# Altium footprint library AVP32F335_EVM_Rev1.0.PcbLib: 50 footprints (part 3 of 4)
Each footprint in its own frame and in the unit in brackets; x right, y up, seen from the top. Pads: shape width x height; smd on the part's side, far side on the other; paste and mask are expansions set on the pad; w line width, h text height; cw(c..) or ccw(c..) is an arc to the next point about the centre after c.
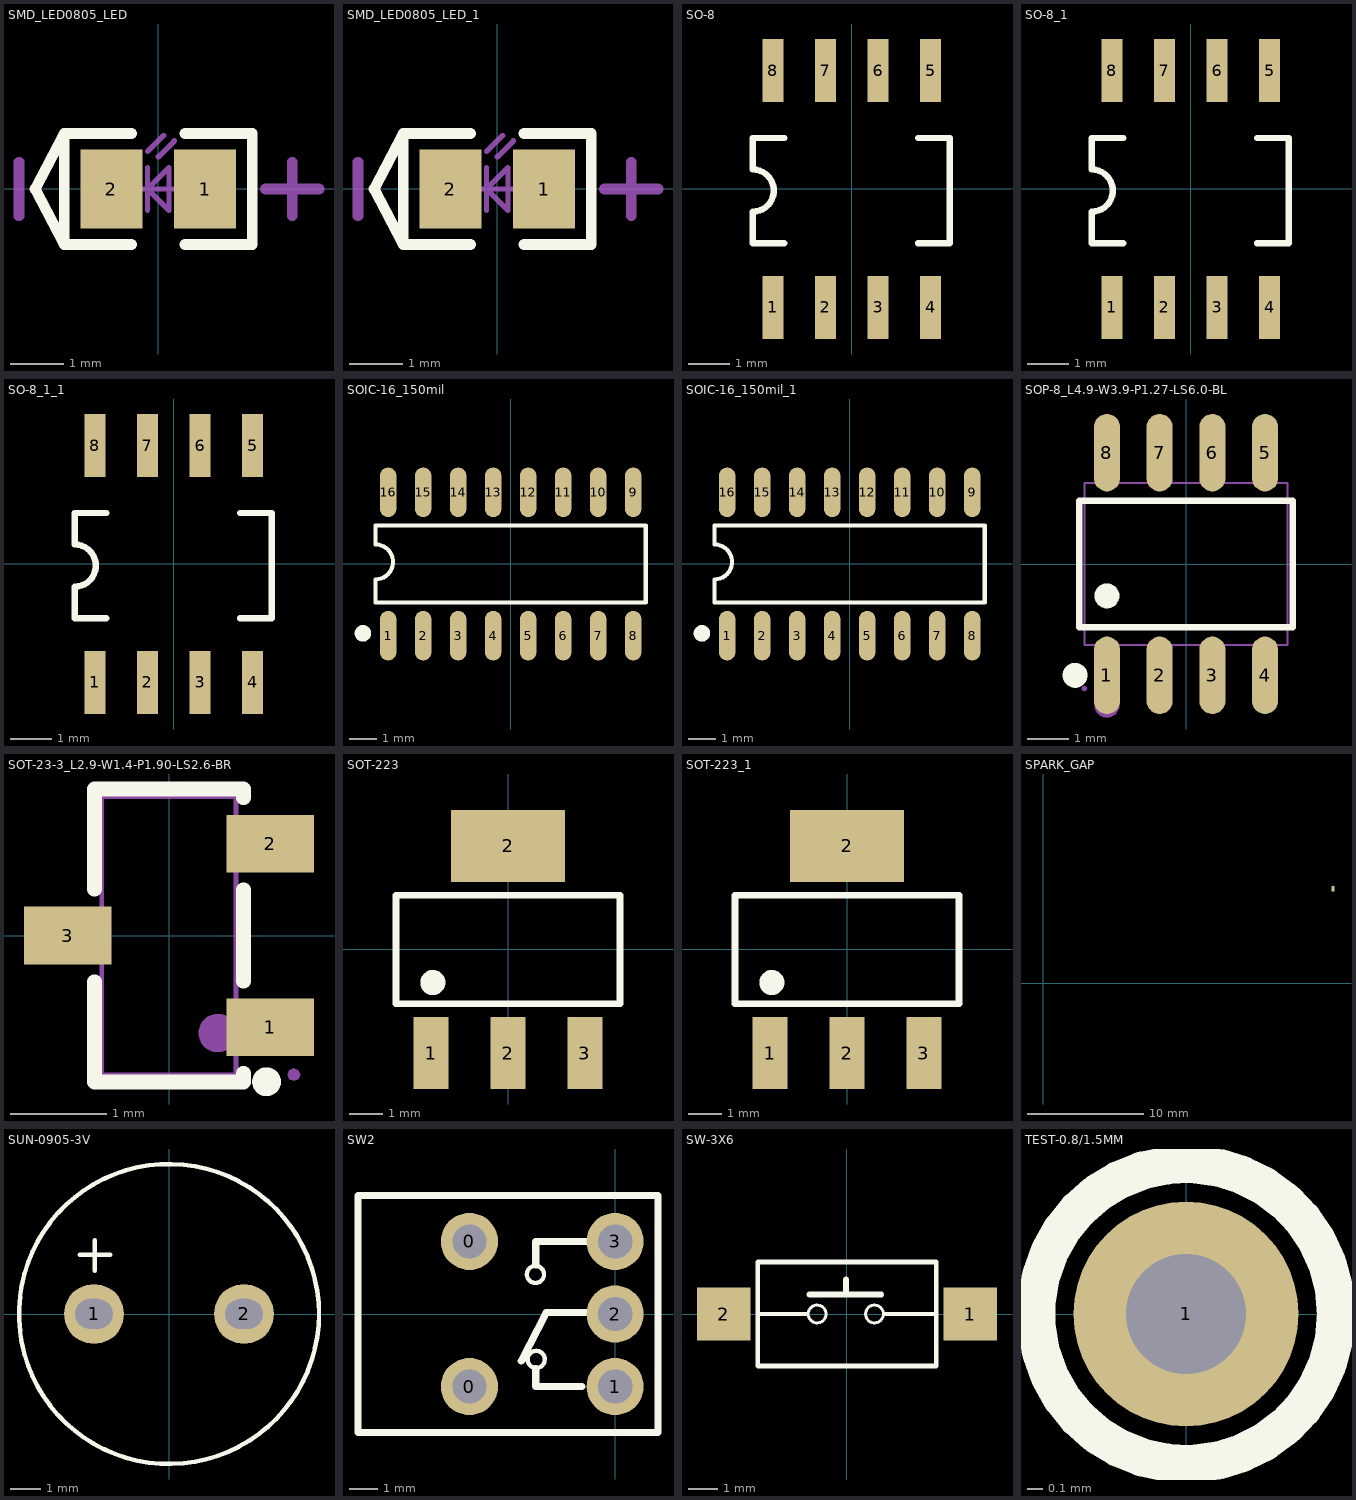
[diagram p2: the footprints below, top view; thin cyan lines are the x and y axes]

## SMD_LED0805_LED [mm]
height 11
pads (2):
  rect 1.16x1.47 smd: 1(0.875,0) 2(-0.875,0)
Top Overlay:
  lines w0.2: -0.5,-1.035 -1.755,-1.035 ; -0.5,1.035 -1.755,1.035 ; 0.5,-1.035 1.755,-1.035 1.755,1.035 0.5,1.035 ; -1.755,-1.035 -2.3,0 -1.755,1.035 ; -1.755,-1.035 -1.755,1.035
Mechanical 13:
  lines w0.1: -0.4,0 0.4,0 ; -0.2,-0.4 -0.2,0.4 ; -0.2,0.7 0.1,1 ; 0,0.6 0.3,0.9 ; -0.2,0 0.2,-0.4 0.2,0.4 -0.2,0
Mechanical 15:
  lines w0.203: -2.6,-0.5 -2.6,0.5 ; 2,0 3,0 ; 2.5,-0.5 2.5,0.5
3D body "User Library-led_0805.step": height 1.1, standoff 0, extent -1.01,-0.625 1.01,0.625

## SMD_LED0805_LED_1 [mm]
height 8
pads (2):
  rect 1.16x1.47 smd: 1(0.875,0) 2(-0.875,0)
Top Overlay:
  lines w0.2: -0.5,-1.035 -1.755,-1.035 ; -0.5,1.035 -1.755,1.035 ; 0.5,-1.035 1.755,-1.035 1.755,1.035 0.5,1.035 ; -1.755,-1.035 -1.755,1.035 ; -1.755,-1.035 -2.3,0 -1.755,1.035
Mechanical 13:
  lines w0.1: -0.4,0 0.4,0 ; -0.2,-0.4 -0.2,0.4 ; -0.2,0.7 0.1,1 ; 0,0.6 0.3,0.9 ; -0.2,0 0.2,0.4 0.2,-0.4 -0.2,0
Mechanical 15:
  lines w0.203: -2.6,-0.5 -2.6,0.5 ; 2,0 3,0 ; 2.5,-0.5 2.5,0.5
3D body "User Library-led_0805.step": height 1.1, standoff 0, extent -1.01,-0.625 1.01,0.625

## SO-8 [mil]
pads (8):
  rect 20x60 smd: 1(-75,-112.5) 2(-25,-112.5) 3(25,-112.5) 4(75,-112.5) 5(75,112.5) 6(25,112.5) 7(-25,112.5) 8(-75,112.5)
Top Overlay:
  lines w6: -64,-51.5 -94,-51.5 -94,-21.5 ccw(c-94,-1.5) -94,18.5 -94,48.5 -64,48.5 ; 63,-51.5 93,-51.5 93,48.5 63,48.5
3D body "m08a.stp": height 63.98, standoff 0, extent -96.45,-111.1 96.46,125.12

## SO-8_1 [mil]
height 35.43
pads (8):
  rect 20x60 smd: 1(-75,-112.5) 2(-25,-112.5) 3(25,-112.5) 4(75,-112.5) 5(75,112.5) 6(25,112.5) 7(-25,112.5) 8(-75,112.5)
Top Overlay:
  lines w6: -64,-51.5 -94,-51.5 -94,-21.5 ccw(c-94,-1.5) -94,18.5 -94,48.5 -64,48.5 ; 63,-51.5 93,-51.5 93,48.5 63,48.5
3D body "m08a.stp": height 63.98, standoff 0, extent -96.45,-111.1 96.46,125.12

## SO-8_1_1 [mil]
height 35.43
pads (8):
  rect 20x60 smd: 1(-75,-112.5) 2(-25,-112.5) 3(25,-112.5) 4(75,-112.5) 5(75,112.5) 6(25,112.5) 7(-25,112.5) 8(-75,112.5)
Top Overlay:
  lines w6: -64,-51.5 -94,-51.5 -94,-21.5 ccw(c-94,-1.5) -94,18.5 -94,48.5 -64,48.5 ; 63,-51.5 93,-51.5 93,48.5 63,48.5
3D body "m08a.stp": height 63.98, standoff 0, extent -96.45,-111.1 96.46,125.12

## SOIC-16_150mil [mm]
height 6.34
pads (16):
  oval 0.6x1.8 smd: 1(-4.445,-2.6) 2(-3.175,-2.6) 3(-1.905,-2.6) 4(-0.635,-2.6) 5(0.635,-2.6) 6(1.905,-2.6) 7(3.175,-2.6) 8(4.445,-2.6) 9(4.445,2.6) 10(3.175,2.6) 11(1.905,2.6) 12(0.635,2.6) 13(-0.635,2.6) 14(-1.905,2.6) 15(-3.175,2.6) 16(-4.445,2.6)
Top Overlay:
  circle w0.3: c-5.359,-2.515 r0.15
  lines w0.15: -4.902,1.397 -4.902,0.711 cw(c-4.902,0.076) -4.902,-0.559 -4.902,-1.397 -4.899,-1.4 4.9,-1.4 4.9,1.4 -4.9,1.4
3D body "SW3DPS-SO-16-DEFAULT.step": height 1.45, standoff 0, extent -5.004,-2.8 4.978,3.105

## SOIC-16_150mil_1 [mm]
height 6.34
pads (16):
  oval 0.6x1.8 smd: 1(-4.445,-2.6) 2(-3.175,-2.6) 3(-1.905,-2.6) 4(-0.635,-2.6) 5(0.635,-2.6) 6(1.905,-2.6) 7(3.175,-2.6) 8(4.445,-2.6) 9(4.445,2.6) 10(3.175,2.6) 11(1.905,2.6) 12(0.635,2.6) 13(-0.635,2.6) 14(-1.905,2.6) 15(-3.175,2.6) 16(-4.445,2.6)
Top Overlay:
  circle w0.3: c-5.359,-2.515 r0.15
  lines w0.15: -4.902,1.397 -4.902,0.711 cw(c-4.902,0.076) -4.902,-0.559 -4.902,-1.397 -4.899,-1.4 4.9,-1.4 4.9,1.4 -4.9,1.4
3D body "SW3DPS-SO-16-DEFAULT.step": height 1.45, standoff 0, extent -5.004,-2.8 4.978,3.105

## SOP-8_L4.9-W3.9-P1.27-LS6.0-BL [mm]
height 10.6
pads (8):
  oval 0.63x1.865 smd: 1(-1.905,-2.682) 2(-0.635,-2.682) 3(0.635,-2.682) 4(1.905,-2.682) 5(1.905,2.683) 6(0.635,2.683) 7(-0.635,2.683) 8(-1.905,2.683)
Top Overlay:
  circle w0.3: c-1.905,-0.769 r0.15
  circle w0.3: c-2.672,-2.682 r0.15
  lines w0.152: -2.576,-1.521 -2.576,1.521 2.576,1.521 2.576,-1.521 -2.576,-1.521
Mechanical 6:
  circle w0.3: c-1.905,-3.4 r0.15
Mechanical 15:
  region: -2.385,-3 -2.404,-2.954 -2.45,-2.935 -2.496,-2.954 -2.515,-3 -2.496,-3.046 -2.45,-3.065 -2.404,-3.046
  region: 1.695,1.94 1.695,2.175 2.115,2.175 2.115,1.94
  region: 1.695,2.165 1.695,3 2.115,3 2.115,2.165
  region: 0.425,1.94 0.425,2.175 0.845,2.175 0.845,1.94
  region: 0.425,2.165 0.425,3 0.845,3 0.845,2.165
  region: -0.845,1.94 -0.845,2.175 -0.425,2.175 -0.425,1.94
  region: -0.845,2.165 -0.845,3 -0.425,3 -0.425,2.165
  region: -2.115,1.94 -2.115,2.175 -1.695,2.175 -1.695,1.94
  region: -2.115,2.165 -2.115,3 -1.695,3 -1.695,2.165
  region: 1.695,-2.175 1.695,-1.94 2.115,-1.94 2.115,-2.175
  region: 1.695,-3 1.695,-2.165 2.115,-2.165 2.115,-3
  region: 0.425,-2.175 0.425,-1.94 0.845,-1.94 0.845,-2.175
  region: 0.425,-3 0.425,-2.165 0.845,-2.165 0.845,-3
  region: -0.845,-2.175 -0.845,-1.94 -0.425,-1.94 -0.425,-2.175
  region: -0.845,-3 -0.845,-2.165 -0.425,-2.165 -0.425,-3
  region: -2.115,-2.175 -2.115,-1.94 -1.695,-1.94 -1.695,-2.175
  region: -2.115,-3 -2.115,-2.165 -1.695,-2.165 -1.695,-3
  lines w0.051: -2.45,-1.95 -2.45,1.95 2.45,1.95 2.45,-1.95 -2.45,-1.95

## SOT-23-3_L2.9-W1.4-P1.90-LS2.6-BR [mm]
height 10.6
pads (3):
  rect 0.91x0.6 smd: 1(1.055,-0.955) 2(1.055,0.955) 3(-1.055,0)
Top Overlay:
  circle w0.15: c1.016,-1.524 r0.075
  lines w0.152: -0.776,-0.48 -0.776,-1.526 0.776,-1.526 0.776,-1.435 ; -0.776,0.48 -0.776,1.526 0.776,1.526 0.776,1.435 ; 0.776,-0.475 0.776,0.475
Mechanical 6:
  circle w0.2: c0.508,-1.016 r0.1
Mechanical 15:
  region: 1.365,-1.45 1.346,-1.404 1.3,-1.385 1.254,-1.404 1.235,-1.45 1.254,-1.496 1.3,-1.515 1.346,-1.496
  region: 1.3,-0.73 0.95,-0.73 0.95,-1.18 1.3,-1.18
  region: 0.96,-0.73 0.69,-0.73 0.69,-1.18 0.96,-1.18
  region: 1.3,1.18 0.95,1.18 0.95,0.73 1.3,0.73
  region: 0.96,1.18 0.69,1.18 0.69,0.73 0.96,0.73
  region: -1.3,0.225 -0.95,0.225 -0.95,-0.225 -1.3,-0.225
  region: -0.96,0.225 -0.69,0.225 -0.69,-0.225 -0.96,-0.225
  lines w0.051: -0.7,-1.45 -0.7,1.45 0.7,1.45 0.7,-1.45 -0.7,-1.45

## SOT-223 [mm] "SOT-223/SC-73; 4 Leads; Body 6.7 x 7.3 mm, inc. leads (LxW max)"
height 1.7
pads (4):
  rect 1.05x2.15 smd: 1(-2.3,-3.1) 2(0,-3.1) 3(2.3,-3.1)
  rect 3.4x2.15 smd: 2(0,3.1)
Top Overlay:
  circle w0.5: c-2.249,-0.991 r0.125
  lines w0.2: -3.35,-1.625 3.35,-1.625 3.35,1.625 -3.35,1.625 -3.35,-1.625
3D body "User Library-SOT-223-2.STEP": height 1.85, standoff -0.05, extent -3.295,-3.497 3.405,3.708

## SOT-223_1 [mm] "SOT-223/SC-73; 4 Leads; Body 6.7 x 7.3 mm, inc. leads (LxW max)"
height 1.7
pads (4):
  rect 1.05x2.15 smd: 1(-2.3,-3.1) 2(0,-3.1) 3(2.3,-3.1)
  rect 3.4x2.15 smd: 2(0,3.1)
Top Overlay:
  circle w0.5: c-2.249,-0.991 r0.125
  lines w0.2: -3.35,-1.625 3.35,-1.625 3.35,1.625 -3.35,1.625 -3.35,-1.625
3D body "User Library-SOT-223-2.STEP": height 1.85, standoff -0.05, extent -3.295,-3.497 3.405,3.708

## SPARK_GAP [mil] "无Paste层"
pads (1):
  rect 10x20 smd: 1(980,320)
Top Solder:
  region: -25,-30 25,-30 25,40 -25,40

## SUN-0905-3V [mm] "蜂鸣器/9.6*5 有源 3V 电磁蜂鸣器"
height 5
pads (2):
  round 2 hole 1 slot 1.25 at 0 deg: 1(-2.5,0) 2(2.5,0)
Top Overlay:
  circle w0.15: c0,0 r5
  lines w0.15: -2.972,1.967 -1.956,1.967 ; -2.475,1.448 -2.475,2.464
3D body: height 6, standoff 0, extent -4.994,-4.998 5,4.999
3D body: height 6.05, standoff 1.05, extent -0.75,-0.747 0.75,0.748

## SW2 [mm] "扭子开关单刀无复位无中点"
height 8
pads (5):
  round 2 hole 1.2: 0(-5.1,-2.54) 0(-5.1,2.54) 1(0,-2.54) 2(0,0) 3(0,2.54)
Top Overlay:
  lines w0.15: -2.489,1.386 cw(c-2.789,1.386) -2.489,1.397 ; -2.464,-1.6 cw(c-2.764,-1.589) -2.464,-1.589
  lines w0.254: -3.288,-1.647 -2.413,0.051 -0.152,0.051 -0.025,-0.076 ; -2.781,-1.905 -2.781,-2.541 -1.168,-2.541 ; -2.781,1.727 -2.781,2.541 -0.203,2.541 ; -9,-4.15 -9,4.15 1.5,4.15 1.5,-4.15 -9,-4.15
3D body "User Library-switch et spdt.STEP": height 5.96, standoff -3.48, extent -26.098,-4.115 0.698,4.013

## SW-3X6 [mm] "立创商城 轻触开关 3X6 鸿源精密"
height 2.5
pads (2):
  rect 1.8x1.8 smd mask+0.05: 1(4.15,0) 2(-4.15,0)
Top Overlay:
  circle w0.1: c0.925,0 r0.3
  circle w0.1: c-1.006,0 r0.3
  lines w0.127: -2.946,0 -1.361,0 ; 1.28,0 2.946,0
  lines w0.154: -3,-1.75 3,-1.75 3,1.75 -3,1.75 -3,-1.75
  lines w0.2: -1.26,0.66 1.153,0.66 ; -0.053,0.66 -0.041,0.673 -0.041,1.168
3D body: height 3.5, standoff 0, extent -2.946,-1.751 2.947,1.75
3D body: height 4, standoff 0, extent -1.511,-0.558 1.511,0.507

## TEST-0.8/1.5MM [mm]
height 5.5
pads (1):
  round 1.5 hole 0.8: 1(0,0)
Top Overlay:
  circle w0.254: c0,0 r1